# Altium schematic symbol library SAM-M10Q-00B.SchLib: 1 symbol
Pins are listed as number, name and electrical type; pins without a type are passive.

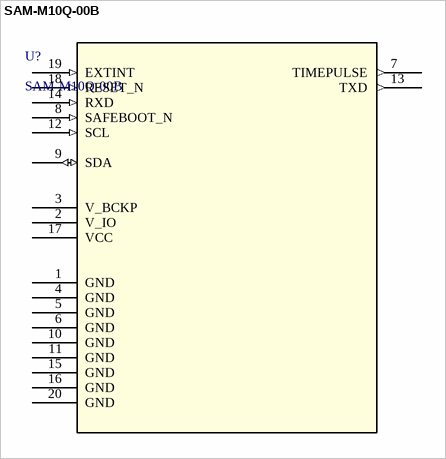
[diagram p0: symbol SAM-M10Q-00B]

## SAM-M10Q-00B
designator U?
Description; Manufacturer_Name: Ublox; Copyright: Copyright (C) 2026 Ultra Librarian. All rights reserved.; Manufacturer_Part_Number: SAM-M10Q-00B; RefDes: RefDes; Type: Type
footprint SAM-M10Q_UBL
pins: 1 GND (power), 2 V_IO (power), 3 V_BCKP (power), 4 GND (power), 5 GND (power), 6 GND (power), 7 TIMEPULSE (out), 8 SAFEBOOT_N (in), 9 SDA (io), 10 GND (power), 11 GND (power), 12 SCL (in), 13 TXD (out), 14 RXD (in), 15 GND (power), 16 GND (power), 17 VCC (power), 18 RESET_N (in), 19 EXTINT (in), 20 GND (power)